# EAGLE library part 6130XX143121_613032143121 (library WR-PHD)
WR-PHD 2.54 mm Angled Socket Header Article Properties Pins 2 unitless; 3 unitless; 4 unitless; 5 unitless; 6 unitless; 7 unitless; 8 unitless; 9 unitless; 10 unitless; 12 unitless; 13 unitless; 15 unitless; 16 unitless; 18 unitless; 20 unitless; 24 unitless; 32 unitless General Information Operating Temperature -40 °C up to +105 °C Pitch 2.54 mm Durability 25 Mating cycles Rows Single Gender Socket Header Type Angled Material Properties Insulator Material PBT Insulator Flammability Rating UL94 V-0 Contact Material Copper Alloy Contact Plating Gold Contact Type Stamped Certification UL Approval E323964 Packaging Properties Packaging Tray Electrical Properties Withstanding Voltage 500 V (AC) Contact Resistance 20 mΩ RISO 1000 MΩ <https://www.we-online.com/components/media/o33212v209%20Family_WR-PHD_6130xx143121.jpg> Details see: www.we-online.com/en/components/products/PHD_2_54_ANGLED_SOCKET_HEADER_6130XX143121 <www.we-online.com/catalog/PHD_2_54_ANGLED_SOCKET_HEADER_6130XX143121/?utm_source=eagle_model&utm_medium=description_link&utm_campaign=eisos_eagle> Updated by Yingchun,Shan 2019-10-22 2019 (C) Würth Elektronik
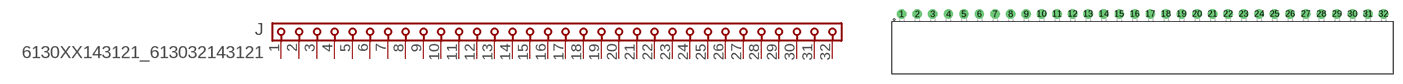
[diagram p153: symbol with the pads of 613032143121; footprint 613032143121]

Designator prefix J

## 6130XX143121_613032143121 (DATASHEET-URL: https://www.we-online.com/redexpert/spec/613032143121?ae; GENDER: Socket Header; IR: 3A; MOUNT: THT; PACKAGING: Tray; PART-NUMBER: 613032143121; PINS: 32; PITCH: 2.54 mm; ROWS: Single; TYPE: Angled; VALUE: 613032143121)  [613032143121]
1  1  pas
2  2  pas
3  3  pas
4  4  pas
5  5  pas
6  6  pas
7  7  pas
8  8  pas
9  9  pas
10  10  pas
11  11  pas
12  12  pas
13  13  pas
14  14  pas
15  15  pas
16  16  pas
17  17  pas
18  18  pas
19  19  pas
20  20  pas
21  21  pas
22  22  pas
23  23  pas
24  24  pas
25  25  pas
26  26  pas
27  27  pas
28  28  pas
29  29  pas
30  30  pas
31  31  pas
32  32  pas

## Footprint 613032143121 (pad centres in mm)
WR-PHD 2.54 mm Angled Socket Header, 32 Pins
drill 1.02: 1 -39.37,5.55; 2 -36.83,5.55; 3 -34.29,5.55; 4 -31.75,5.55; 5 -29.21,5.55; 6 -26.67,5.55; 7 -24.13,5.55; 8 -21.59,5.55; 9 -19.05,5.55; 10 -16.51,5.55; 11 -13.97,5.55; 12 -11.43,5.55; 13 -8.89,5.55; 14 -6.35,5.55; 15 -3.81,5.55; 16 -1.27,5.55; 17 1.27,5.55; 18 3.81,5.55; 19 6.35,5.55; 20 8.89,5.55; 21 11.43,5.55; 22 13.97,5.55; 23 16.51,5.55; 24 19.05,5.55; 25 21.59,5.55; 26 24.13,5.55; 27 26.67,5.55; 28 29.21,5.55; 29 31.75,5.55; 30 34.29,5.55; 31 36.83,5.55; 32 39.37,5.55